# Altium schematic symbol library Inductor.SchLib: 326 symbols (part 2 of 7)
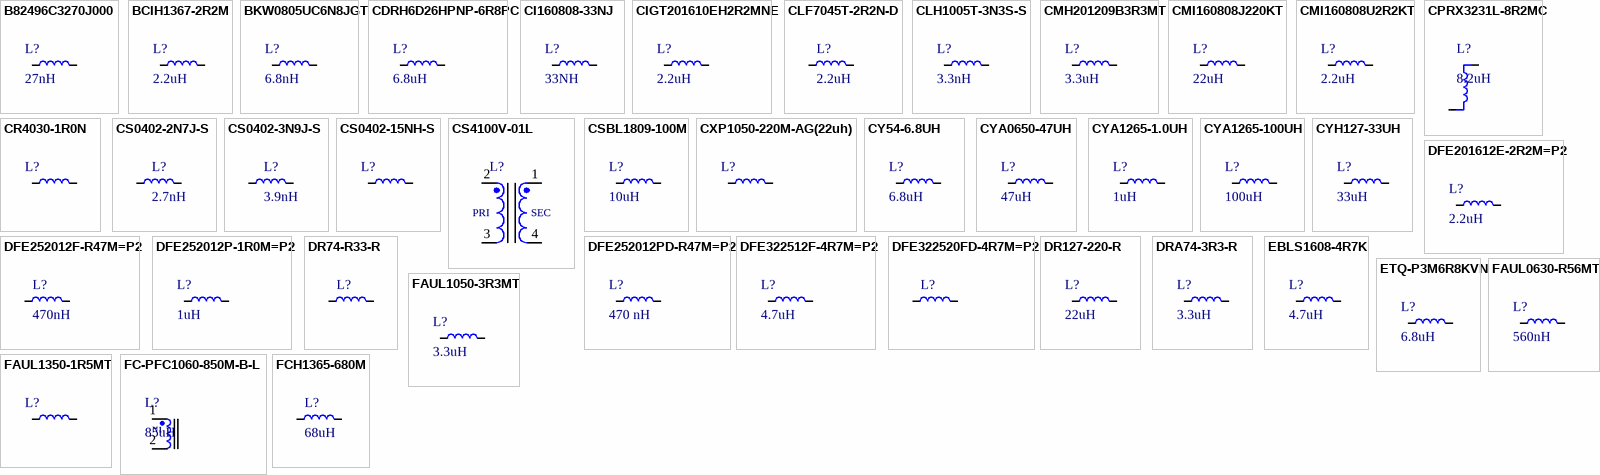
[diagram p9: symbols B82496C3270J000 to FCH1365-680M]

## CMI160808U2R2KT
designator L?, comment 2.2uH
25mA 2.2uH ±10% 800mΩ 0603 Inductors (SMD) ROHS; Manufacturer: FH; Manufacturer Part Number: CMI160808U2R2KT; Value: 2.2uH; Footprint: 0603; ComponentLink1Description: LCSC; ComponentLink1URL: https://lcsc.com/product-detail/Inductors-SMD_FH-Guangdong-Fenghua-Advanced-Tech-CMI160808U2R2KT_C284875.html; LCSC Part Number: C284875
footprint IND-0603 (1608 Metric) (0.063" L x 0.032" W (1.60mm x 0.80mm))
pins: 1, 2

## CPRX3231L-8R2MC
designator L?, comment 8.2uH
THT HIGH CURRENT POWER INDUCTOR; Manufacturer: Codaca; Manufacturer Part Number: CPRX3231L-8R2MC; Item Type: INDUCTOR; RoHS: No; Stock: 21; Pricing: 1=20.99, 10=16.268, 25=14.688, 40=13.93475, 80=12.88975, 230=12.5 (USD)
footprint CPRX3231L-8R2MC
pins: 1, 2

## CR4030-1R0N
designator L?
3.4A 1uH ±30% 5.9A SMD,4x4mm Power Inductors ROHS; Manufacturer: Ceaiya; Manufacturer Part Number: CR4030-1R0N; Package: SMD,4x4mm; LCSC Part Number: C520322; Item Type: Inductor; ComponentLink1Description: LCSC; ComponentLink1URL: https://www.lcsc.com/product-detail/Power-Inductors_Ceaiya-CR4030-1R0N_C520322.html?s_z=n_B82462G4102M
footprint CR4030-1R0N
pins: 1, 2

## CS0402-2N7J-S
designator L?, comment 2.7nH
640mA 2.7nH ±5% 120mΩ 0402 Inductors (SMD) ROHS; Manufacturer: Chilisin Elec; Manufacturer Part Number: CS0402-2N7J-S; Package: 0402; LCSC Part Number: C142181; Item Type: Inductors; ComponentLink1Description: LCSC; ComponentLink1URL: https://www.lcsc.com/product-detail/Inductors-SMD_Chilisin-Elec-CS0402-2N7J-S_C142181.html
footprint IND-0402
pins: 1, 2

## CS0402-3N9J-S
designator L?, comment 3.9nH
840mA 3.9nH ±5% 66mΩ 0402 Inductors (SMD) ROHS; Manufacturer: Chilisin Elec; Manufacturer Part Number: CS0402-3N9J-S; Package: 0402; LCSC Part Number: C329623; Item Type: Inductor; ComponentLink1Description: LCSC; ComponentLink1URL: https://www.lcsc.com/product-detail/Inductors-SMD_Chilisin-Elec-CS0402-3N9J-S_C329623.html
footprint IND-0402
pins: 1, 2

## CS0402-15NH-S
designator L?
560mA 15nH ±3% 170mΩ 0402 Inductors (SMD) ROHS; Manufacturer: Chilisin Elec; Manufacturer Part Number: CS0402-15NH-S; Package: 0402; LCSC Part Number: C329619; Item Type: Inductor; ComponentLink1Description: LCSC; ComponentLink1URL: https://www.lcsc.com/product-detail/Inductors-SMD_Chilisin-Elec-CS0402-15NH-S_C329619.html
footprint IND-0402
pins: 1, 2

## CS4100V-01L
designator L?
Transformer, Current Sense, 1: 100, 24A; Manufacturer: Coilcraft; Manufacturer Part Number: CS4100V-01L; Item Type: Inductors; Turns Ratio: 1:100; DC Resistance (DCR): 7mR; Value: 20mH; Supplier: Mouser; Supplier Part Number: 994-CS4100V-01L; RoHS: Yes; Stock: 520; Pricing: 1=11.28, 10=11.28, 50=11.28, 100=11.28, 1000=5.53, 10000=5.14 (USD); Primary Current: 24A; Packaging: Rail/Tube; Package Quantity: 29; Series: CS4xxx; Reach SVHC Compliant: No; Lead Free: Contains Lead; RoHS Compliant: Yes; ComponentLink1URL: http://www.mouser.com/ds/2/597/senhitr-463493.pdf?src-supplier=Mouser; ComponentLink1Description: http://www.mouser.com/ds/2/597/senhitr-463493.pdf?src-supplier=Mouser; ComponentLink2URL: http://www.farnell.com/datasheets/1870394.pdf?src-supplier=Farnell; ComponentLink2Description: http://www.farnell.com/datasheets/1870394.pdf?src-supplier=Farnell; ComponentLink3URL: http://www.farnell.com/datasheets/1870394.pdf?src-supplier=Element14; ComponentLink3Description: http://www.farnell.com/datasheets/1870394.pdf?src-supplier=Element14
footprint CS4100V-01L
pins: 1, 2, 3, 4
text: PRI; SEC

## CSBL1809-100M
designator L?, comment 10uH
SMD HIGH CURRENT POWER INDUCTOR; Manufacturer: Codaca; Manufacturer Part Number: CSBL1809-100M; Supplier: DigiKey; Supplier Part Number: 4044-CSBL1809-100MCT-ND; RoHS: No; Category: Fixed Inductors; Stock: 69; Pricing: 1=4.25, 10=3.304, 25=2.986, 50=2.7654 (USD)
footprint CSBL1809-100M
pins: 1, 2

## CXP1050-220M-AG(22uh)
designator L?
5.5A 22uH Molding Choke ±20% 8A 1050 Power Inductors ROHS; Manufacturer: DMBJ; Manufacturer Part Number: CXP1050-220M-AG(22uh); Package: 1050; LCSC Part Number: C7461393; Item Type: Inductor; ComponentLink1Description: LCSC; ComponentLink1URL: https://www.lcsc.com/product-detail/Power-Inductors_DMBJ-CXP1050-220M-AG-22uh_C7461393.html
footprint CXP1050-220M-AG(22uh)
pins: 1, 2

## CY54-6.8UH
designator L?, comment 6.8uH
2.4A 6.8uH ±20% 58.5mΩ SMD,5.2x5.8mm Inductors (SMD) ROHS; Manufacturer: SHOU HAN; Manufacturer Part Number: CY54-6.8UH; Package: SMD,5.2x5.8mm; LCSC Part Number: C2929430; Item Type: Inductor; ComponentLink1Description: LCSC; ComponentLink1URL: https://www.lcsc.com/product-detail/Inductors-SMD_SHOU-HAN-CY54-6-8UH_C2929430.html
footprint CY54-6.8UH
pins: 1, 2

## CYA0650-47UH
designator L?, comment 47uH
2A 47uH ±20% 250mΩ SMD,6.6x7.2mm Inductors (SMD) ROHS; Manufacturer: SHOU HAN; Manufacturer Part Number: CYA0650-47UH; Package: SMD,6.6x7.2mm; LCSC Part Number: C5189938; Item Type: Inductor; ComponentLink1Description: LCSC; ComponentLink1URL: https://www.lcsc.com/product-detail/Inductors-SMD_SHOU-HAN-CYA0650-47UH_C5189938.html
footprint CYA0650-47UH
pins: 1, 2

## CYA1265-1.0UH
designator L?, comment 1uH
32A 1uH Integrated molded inductor ±20% 54A SMD,13.8x12.8mm Power Inductors ROHS; Manufacturer: SHOU HAN; Manufacturer Part Number: CYA1265-1.0UH; Package: SMD,13.8x12.8mm; LCSC Part Number: C19268663; Item Type: Inductor; ComponentLink1Description: LCSC; ComponentLink1URL: https://lcsc.com/product-detail/Power-Inductors_SHOU-HAN-CYA1265-1-0UH_C19268663.html
footprint CYA1265-1.0UH
pins: 1, 2

## CYA1265-100UH
designator L?, comment 100uH
4.5A 100uH Molding Choke ±20% 8.5A SMD,13.8x12.8mm Power Inductors ROHS; Manufacturer: SHOU HAN; Manufacturer Part Number: CYA1265-100UH; Supplier: LCSC; LCSC Part Number: C19268674; RoHS: No; Item Type: Inductor
footprint CYA1265-100UH
pins: 1, 2

## CYH127-33UH
designator L?, comment 33uH
3A 33uH ±20% 64.8mΩ SMD,12.3x12.3mm Inductors (SMD) ROHS; Manufacturer: SHOU HAN; Manufacturer Part Number: CYH127-33UH; Package: SMD,12.3x12.3mm; LCSC Part Number: C2929502; Item Type: Inductor; ComponentLink1Description: LCSC; ComponentLink1URL: https://www.lcsc.com/product-detail/Inductors-SMD_SHOU-HAN-CYH127-33UH_C2929502.html
footprint CYH127-33UH
pins: 1, 2

## DFE201612E-2R2M=P2
designator L?, comment 2.2uH
FIXED IND 2.2UH 1.8A 116MOHM SMD; Manufacturer: Murata; Manufacturer Part Number: DFE201612E-2R2M=P2; Item Type: Inductors; Inductance Tolerance: 20%; Saturation Current: 2.4A; ESR: 116mR; Test Frequency: 1MHz; Supplier: Mouser; LCSC Part Number: C337893; RoHS: Yes; Stock: 140327; Pricing: 1=0.31, 10=0.202, 50=0.202, 100=0.158, 1000=0.145, 10000=0.104 (USD); Min Operating Temperature: -40°C; Max Operating Temperature: 125°C; Current Rating: 1.8A; Value: 2.2uH; Packaging: 13Packaging; RMS Current (Irms): 1.8A; Height: 1.2mm; ComponentLink1URL: http://www.farnell.com/datasheets/2339714.pdf?src-supplier=Farnell; ComponentLink1Description: http://www.farnell.com/datasheets/2339714.pdf?src-supplier=Farnell; ComponentLink2URL: https://search.murata.co.jp/Ceramy/image/img/P02/J(E)TE243A-0006.pdf?src-supplier=Digikey; ComponentLink2Description: https://search.murata.co.jp/Ceramy/image/img/P02/J(E)TE243A-0006.pdf?src-supplier=Digikey; ComponentLink3URL: http://www.farnell.com/datasheets/2339714.pdf?src-supplier=Newark; ComponentLink3Description: http://www.farnell.com/datasheets/2339714.pdf?src-supplier=Newark; ComponentLink4URL: https://datasheet.octopart.com/DFE201612E-2R2M%3DP2-Murata-datasheet-150582460.pdf?src-supplier=Arrow.cn; ComponentLink4Description: https://datasheet.octopart.com/DFE201612E-2R2M%3DP2-Murata-datasheet-150582460.pdf?src-supplier=Arrow.cn
footprint IND-0806
pins: 1, 2

## DFE252012F-R47M=P2
designator L?, comment 470nH
FIXED IND 470NH 4.9A 0.023OHM SM; Manufacturer: Murata; Manufacturer Part Number: DFE252012F-R47M=P2; Item Type: Inductor; Supplier: Mouser; Supplier Part Number: 81-DFE252012F-R47MP2; RoHS: Yes; Category: Fixed Inductors; Stock: 151013; Pricing: 1=0.32, 10=0.256, 50=0.256, 100=0.191, 1000=0.134, 10000=0.111 (USD); ComponentLink1URL: http://www.murata.com/~/media/webrenewal/products/inductor/chip/tokoproducts/wirewoundmetalalloychiptype/m_dfe252012f.ashx?src-supplier=Digikey; ComponentLink1Description: http://www.murata.com/~/media/webrenewal/products/inductor/chip/tokoproducts/wirewoundmetalalloychiptype/m_dfe252012f.ashx?src-supplier=Digikey; ComponentLink2URL: https://www.murata.com/~/media/webrenewal/products/inductor/chip/tokoproducts/wirewoundmetalalloychiptype/m_dfe252012f.ashx?src-supplier=Digikey; ComponentLink2Description: https://www.murata.com/~/media/webrenewal/products/inductor/chip/tokoproducts/wirewoundmetalalloychiptype/m_dfe252012f.ashx?src-supplier=Digikey; ComponentLink3URL: https://datasheet.octopart.com/DFE252012F-R47M%3DP2-Murata-datasheet-141944277.pdf?src-supplier=Arrow.cn; ComponentLink3Description: https://datasheet.octopart.com/DFE252012F-R47M%3DP2-Murata-datasheet-141944277.pdf?src-supplier=Arrow.cn
footprint Inductor 1008
pins: 1, 2

## DFE252012P-1R0M=P2
designator L?, comment 1uH
FIXED IND 1UH 3.2A 0.042OHM SMD; Manufacturer: Murata; Manufacturer Part Number: DFE252012P-1R0M=P2; Item Type: Inductor; Core Material: Ferrite; Current Rating: 4.3A; Shielding: Shielded; DC Resistance (DCR): 42mR; Test Frequency: 1MHz; Tolerance: 20%; Supplier: Future Electronics; LCSC Part Number: C882955; RoHS: Yes; Stock: 30000; Pricing: 3000=0.103, 6000=0.1, 9000=0.0987, 12000=0.0976, 15000=0.0942 (USD); Mounting Technology: Surface Mount; Case/Package: 1008; Case Code (Metric): 2520; Case Code (Imperial): 1008; Min Operating Temperature: -40°C; Max Operating Temperature: 125°C; Value: 1uH; Packaging: Cut Tape; Max DC Current: 3.2A; Series: DFE252012P; Inductance Tolerance: 20%; RMS Current (Irms): 3.2A; Saturation Current: 4.3A; ESR: 42mR; Length: 0.098inch; Width: 0.079inch; Height: 1.2mm; Height - Seated (Max): 0.039inch; Depth: 2mm; RoHS Compliant: Yes; ComponentLink1URL: http://www.farnell.com/datasheets/2550134.pdf?src-supplier=Farnell; ComponentLink1Description: http://www.farnell.com/datasheets/2550134.pdf?src-supplier=Farnell; ComponentLink2URL: https://www.murata.com/~/media/webrenewal/products/inductor/chip/tokoproducts/wirewoundmetalalloychiptype/m_dfe252012p.ashx?src-supplier=Digikey; ComponentLink2Description: https://www.murata.com/~/media/webrenewal/products/inductor/chip/tokoproducts/wirewoundmetalalloychiptype/m_dfe252012p.ashx?src-supplier=Digikey; ComponentLink3URL: http://www.murata.com/~/media/webrenewal/products/inductor/chip/tokoproducts/wirewoundmetalalloychiptype/m_dfe252012p.ashx?src-supplier=Digikey; ComponentLink3Description: http://www.murata.com/~/media/webrenewal/products/inductor/chip/tokoproducts/wirewoundmetalalloychiptype/m_dfe252012p.ashx?src-supplier=Digikey; ComponentLink4URL: http://www.toko.co.jp/products/pdf/inductors/dfe252012p.pdf?src-supplier=Avnet; ComponentLink4Description: http://www.toko.co.jp/products/pdf/inductors/dfe252012p.pdf?src-supplier=Avnet
footprint IND-1008 (2520 Metric)
pins: 1, 2

## DFE252012PD-R47M=P2
designator L?, comment 470 nH
FIXED IND 470NH 4A 0.027OHM SMD; Manufacturer: Murata; Manufacturer Part Number: DFE252012PD-R47M=P2; Item Type: Inductors; Inductance Tolerance: 20%; Saturation Current: 5.2A; ESR: 27mR; Test Frequency: 1MHz; Supplier: Mouser; Supplier Part Number: 81-DFE252012PDR47MP2; RoHS: Yes; Stock: 74061; Pricing: 1=0.48, 10=0.342, 50=0.342, 100=0.249, 1000=0.217, 10000=0.201 (USD); Min Operating Temperature: -40°C; Max Operating Temperature: 125°C; Current Rating: 4A; Value: 470nH; RMS Current (Irms): 4A; Tolerance: 20%; Height: 1.2mm; RoHS Compliant: Yes; ComponentLink1URL: http://www.farnell.com/datasheets/2616814.pdf?src-supplier=Farnell; ComponentLink1Description: http://www.farnell.com/datasheets/2616814.pdf?src-supplier=Farnell; ComponentLink2URL: https://search.murata.co.jp/Ceramy/image/img/P02/J(E)TE243A-9102.pdf?src-supplier=Digikey; ComponentLink2Description: https://search.murata.co.jp/Ceramy/image/img/P02/J(E)TE243A-9102.pdf?src-supplier=Digikey; ComponentLink3URL: http://www.farnell.com/datasheets/2616814.pdf?src-supplier=Newark; ComponentLink3Description: http://www.farnell.com/datasheets/2616814.pdf?src-supplier=Newark
footprint IND-1008 (2520 Metric)
pins: 1, 2

## DFE322512F-4R7M=P2
designator L?, comment 4.7uH
FIXED IND 4.7UH 1.6A 157MOHM SMD; Manufacturer: Murata; Manufacturer Part Number: DFE322512F-4R7M=P2; Item Type: Inductor; Supplier 1: Digi-Key; RoHS: Yes; Category: Fixed Inductors; Stock 1: 4687; Pricing 1: 1=0.61, 10=0.533, 25=0.4952, 50=0.4188, 100=0.3808, 250=0.35792, 500=0.31984, 1000=0.25892 (USD); RoHS Compliant: Yes; Supplier Part Number 1: 490-DFE322512F-4R7M=P2CT-ND; LCSC Part Number: C703083
footprint IND-1210
pins: 1, 2

## DFE322520FD-4R7M=P2
designator L?
FIXED IND 4.7UH 2A 98 MOHM SMD; Manufacturer: Murata; Manufacturer Part Number: DFE322520FD-4R7M=P2; Item Type: Inductor; Supplier: Mouser; Supplier Part Number: 81-DFE322520FD4R7MP2; RoHS: Yes; Category: Fixed Inductors; Stock: 15591; Pricing: 1=0.88, 10=0.711, 50=0.711, 100=0.523, 1000=0.523, 10000=0.435 (USD); LCSC Part Number: C2045343
footprint IND-1210
pins: 1, 2

## DR74-R33-R
designator L?
Inductor Power Shielded Drum Core 330nH 20% 100KHz Ferrite 6.26A 7.4mOhm DCR T/R; Manufacturer: Eaton Cooper; Manufacturer Part Number: DR74-R33-R; Supplier: Digikey; Supplier Part Number: 283-4071-1-ND; RoHS: Yes; Category: Fixed Inductors; Stock: 3573; Pricing: 1=0.59, 10=0.498, 25=0.4528, 50=0.4254, 100=0.353, 250=0.32588, 500=0.31876 (USD); ComponentLink1URL: https://datasheet.ciiva.com/14667/0900766b8116a153-14667792.pdf?src-supplier=Rs; ComponentLink1Description: https://datasheet.ciiva.com/14667/0900766b8116a153-14667792.pdf?src-supplier=Rs; ComponentLink2URL: https://datasheet.ciiva.com/48955/70037876-48955195.pdf?src-supplier=Allied+Electronics; ComponentLink2Description: https://datasheet.ciiva.com/48955/70037876-48955195.pdf?src-supplier=Allied+Electronics; ComponentLink3URL: https://datasheet.ciiva.com/14123/dr-series-eng-tds-14123509.pdf?src-supplier=Distrelec; ComponentLink3Description: https://datasheet.ciiva.com/14123/dr-series-eng-tds-14123509.pdf?src-supplier=Distrelec; ComponentLink4URL: https://datasheet.ciiva.com/8004/87246-8004903.pdf?src-supplier=Element14; ComponentLink4Description: https://datasheet.ciiva.com/8004/87246-8004903.pdf?src-supplier=Element14; ComponentLink5URL: https://datasheet.ciiva.com/16497/4a32919a-7470-4ae0-be45-b59e3a1351ef-16497580.pdf?src-supplier=Future+Electronics; ComponentLink5Description: https://datasheet.ciiva.com/16497/4a32919a-7470-4ae0-be45-b59e3a1351ef-16497580.pdf?src-supplier=Future+Electronics; ComponentLink6URL: https://datasheet.ciiva.com/30186/43bus-elx-ds-4315-dr-ser-30186054.pdf?src-supplier=Onlinecomponents.com; ComponentLink6Description: https://datasheet.ciiva.com/30186/43bus-elx-ds-4315-dr-ser-30186054.pdf?src-supplier=Onlinecomponents.com
footprint DR74-R33-R
pins: 1, 2

## DR127-220-R
designator L?, comment 22uH
FIXED IND 22UH 4A 39.1 MOHM SMD; Manufacturer: Eaton Cooper; Manufacturer Part Number: DR127-220-R; Item Type: Inductors; Series Resistance: 39.1mR; Supplier 1: Avnet; RoHS: Yes; Stock 1: 13650; Pricing 1: 350=0.46278 (USD); Lead Free: 5697LeadFree; ComponentLink1URL: https://datasheet.ciiva.com/14667/0900766b8116a153-14667792.pdf?src-supplier=Rs; ComponentLink1Description: https://datasheet.ciiva.com/14667/0900766b8116a153-14667792.pdf?src-supplier=Rs; ComponentLink2URL: https://datasheet.ciiva.com/26858/getdatasheetpartid-250064-26858411.pdf?src-supplier=Verical; ComponentLink2Description: https://datasheet.ciiva.com/26858/getdatasheetpartid-250064-26858411.pdf?src-supplier=Verical; ComponentLink3URL: https://datasheet.ciiva.com/27053/1771712-27053548.pdf?src-supplier=Jameco; ComponentLink3Description: https://datasheet.ciiva.com/27053/1771712-27053548.pdf?src-supplier=Jameco; ComponentLink4URL: https://datasheet.ciiva.com/16433/bus-elx-ds-4315-dr-series-16433965.pdf?src-supplier=Future+Electronics; ComponentLink4Description: https://datasheet.ciiva.com/16433/bus-elx-ds-4315-dr-series-16433965.pdf?src-supplier=Future+Electronics; ComponentLink5URL: https://datasheet.ciiva.com/22771/87246-22771606.pdf?src-supplier=Farnell; ComponentLink5Description: https://datasheet.ciiva.com/22771/87246-22771606.pdf?src-supplier=Farnell; ComponentLink6URL: https://datasheet.ciiva.com/30102/43bus-elx-ds-4315-dr-ser-30102011.pdf?src-supplier=Onlinecomponents.com; ComponentLink6Description: https://datasheet.ciiva.com/30102/43bus-elx-ds-4315-dr-ser-30102011.pdf?src-supplier=Onlinecomponents.com; ComponentLink7URL: https://datasheet.ciiva.com/16940/70037876-16940553.pdf?src-supplier=Allied+Electronics; ComponentLink7Description: https://datasheet.ciiva.com/16940/70037876-16940553.pdf?src-supplier=Allied+Electronics; ComponentLink8URL: https://datasheet.ciiva.com/8004/87246-8004871.pdf?src-supplier=Element14; ComponentLink8Description: https://datasheet.ciiva.com/8004/87246-8004871.pdf?src-supplier=Element14; ComponentLink9URL: https://datasheet.ciiva.com/8005/87246-8005177.pdf?src-supplier=Element14; ComponentLink9Description: https://datasheet.ciiva.com/8005/87246-8005177.pdf?src-supplier=Element14; Supplier Part Number 1: DR127-220-R; LCSC Part Number: C2638525
footprint DR127-220-R
pins: 1, 2

## DRA74-3R3-R
designator L?, comment 3.3uH
FIXED IND 3.3UH 4.16A 16MOHM SMD; Manufacturer: Eaton Cooper; Manufacturer Part Number: DRA74-3R3-R; Item Type: Inductors; Supplier 1: Digikey; RoHS: Yes; Stock 1: 19552; Pricing 1: 1=1.64, 10=1.385, 25=1.2588, 50=1.1834, 100=0.9819, 250=0.90636, 500=0.85602 (USD); Lead Free: 5697LeadFree; ComponentLink1URL: https://datasheet.ciiva.com/6690/9190a0eb-f996-4faf-a4d6-7b76f954f32d-6690234.pdf?src-supplier=Digikey; ComponentLink1Description: https://datasheet.ciiva.com/6690/9190a0eb-f996-4faf-a4d6-7b76f954f32d-6690234.pdf?src-supplier=Digikey; ComponentLink2URL: https://datasheet.ciiva.com/6690/9190a0eb-f996-4faf-a4d6-7b76f954f32d-6690235.pdf?src-supplier=Digikey; ComponentLink2Description: https://datasheet.ciiva.com/6690/9190a0eb-f996-4faf-a4d6-7b76f954f32d-6690235.pdf?src-supplier=Digikey; ComponentLink3URL: https://datasheet.ciiva.com/6690/9190a0eb-f996-4faf-a4d6-7b76f954f32d-6690236.pdf?src-supplier=Digikey; ComponentLink3Description: https://datasheet.ciiva.com/6690/9190a0eb-f996-4faf-a4d6-7b76f954f32d-6690236.pdf?src-supplier=Digikey; ComponentLink4URL: https://datasheet.ciiva.com/16433/9190a0eb-f996-4faf-a4d6-7b76f954f32d-16433947.pdf?src-supplier=Future+Electronics; ComponentLink4Description: https://datasheet.ciiva.com/16433/9190a0eb-f996-4faf-a4d6-7b76f954f32d-16433947.pdf?src-supplier=Future+Electronics; Supplier Part Number 1: 283-3635-1-ND; LCSC Part Number: C3222421
footprint DRA74-3R3-R
pins: 1, 2

## EBLS1608-4R7K
designator L?, comment 4.7uH
15mA 4.7uH ±10% 2.1Ω 0603 Inductors (SMD) ROHS; Manufacturer: HYHONGYEX; Manufacturer Part Number: EBLS1608-4R7K; Value: 4.7uH; Footprint: 0603; ComponentLink1Description: LCSC; ComponentLink1URL: https://lcsc.com/product-detail/Inductors-SMD_HYHONGYEX-EBLS1608-4R7K_C963793.html; LCSC Part Number: C963793
footprint IND-0603 (1608 Metric) (0.063" L x 0.032" W (1.60mm x 0.80mm))
pins: 1, 2

## ETQ-P3M6R8KVN
designator L?, comment 6.8uH
FIXED IND 6.8UH 4.5A 50.16 MOHM; Manufacturer: Panasonic; Manufacturer Part Number: ETQ-P3M6R8KVN; Item Type: Inductors; Value: 45.6mR; Supplier: Mouser; LCSC Part Number: C412310; RoHS: Yes; Stock: 4626; Pricing: 1=0.84, 10=0.609, 50=0.609, 100=0.502, 1000=0.405, 10000=0.344 (USD); ComponentLink1URL: http://www.farnell.com/datasheets/2820815.pdf?src-supplier=Farnell; ComponentLink1Description: http://www.farnell.com/datasheets/2820815.pdf?src-supplier=Farnell; ComponentLink2URL: https://industrial.panasonic.com/cdbs/www-data/pdf/AGL0000/AGL0000C63.pdf?src-supplier=Digikey; ComponentLink2Description: https://industrial.panasonic.com/cdbs/www-data/pdf/AGL0000/AGL0000C63.pdf?src-supplier=Digikey; ComponentLink3URL: https://datasheet.octopart.com/ETQ-P3M6R8KVN-Panasonic-datasheet-136412728.pdf?src-supplier=Element14; ComponentLink3Description: https://datasheet.octopart.com/ETQ-P3M6R8KVN-Panasonic-datasheet-136412728.pdf?src-supplier=Element14
footprint ETQP3M6R8KVN
pins: 1, 2

## FAUL0630-R56MT
designator L?, comment 560nH
16.5A 560nH ±20% 18A SMD,6.6x7mm Power Inductors ROHS; Manufacturer: cjiang (Changjiang Microelectronics Tech); Manufacturer Part Number: FAUL0630-R56MT; Package: SMD,6.6x7mm; LCSC Part Number: C3040346; Item Type: Inductor; ComponentLink1Description: LCSC; ComponentLink1URL: https://www.lcsc.com/product-detail/Power-Inductors_cjiang-Changjiang-Microelectronics-Tech-FAUL0630-R56MT_C3040346.html
footprint FAUL0630-R56MT
pins: 1, 2

## FAUL1050-3R3MT
designator L?, comment 3.3uH
13A 3.3uH Molding Choke ±20% 16A - Power Inductors ROHS; Manufacturer: cjiang; Manufacturer Part Number: FAUL1050-3R3MT; Footprint: Custom; ComponentLink1Description: LCSC; ComponentLink1URL: https://www.lcsc.com/product-detail/Power-Inductors_cjiang-Changjiang-Microelectronics-Tech-FAUL1050-3R3MT_C5298289.html; LCSC Part Number: C5298289; Item Type: Inductor
footprint FAUL1050-3R3MT
pins: 1, 2

## FAUL1350-1R5MT
designator L?
23A 1.5uH Integrated molded inductor ±20% 33A SMD,12.6x13.5mm Power Inductors ROHS; Manufacturer: cjiang; Manufacturer Part Number: FAUL1350-1R5MT; Package: SMD,12.6x13.5mm; LCSC Part Number: C5298318; Item Type: Inductors; ComponentLink1Description: LCSC; ComponentLink1URL: https://www.lcsc.com/product-detail/Power-Inductors_cjiang-Changjiang-Microelectronics-Tech-FAUL1350-1R5MT_C5298318.html
footprint FAUL1350-1R5MT
pins: 1, 2

## FC-PFC1060-850M-B-L
designator L?, comment 85uH
20A 85uH ±15% 10A Plugin,D=35mm Power Inductors ROHS; Manufacturer: FANGCHENG; Manufacturer Part Number: FC-PFC1060-850M-B-L; Package: Plugin,D=35mm; LCSC Part Number: C22461812; Item Type: Inductor; ComponentLink1Description: LCSC; ComponentLink1URL: https://www.lcsc.com/product-detail/Power-Inductors_FANGCHENG-FC-PFC1060-850M-B-L_C22461812.html
footprint FC-PFC1060-850M-B-L
pins: 1, 2
text: N1

## FCH1365-680M
designator L?, comment 68uH
4.5A 68uH Molding Choke ±20% 5.5A SMD,13.7x12.8mm Power Inductors ROHS; Manufacturer: FANGCHENG; Manufacturer Part Number: FCH1365-680M; Package: SMD,13.7x12.8mm; LCSC Part Number: C20415558; Item Type: Inductor; ComponentLink1Description: LCSC; ComponentLink1URL: https://www.lcsc.com/product-detail/Power-Inductors_FANGCHENG-FCH1365-680M_C20415558.html
footprint FCH1365-680M
pins: 1, 2

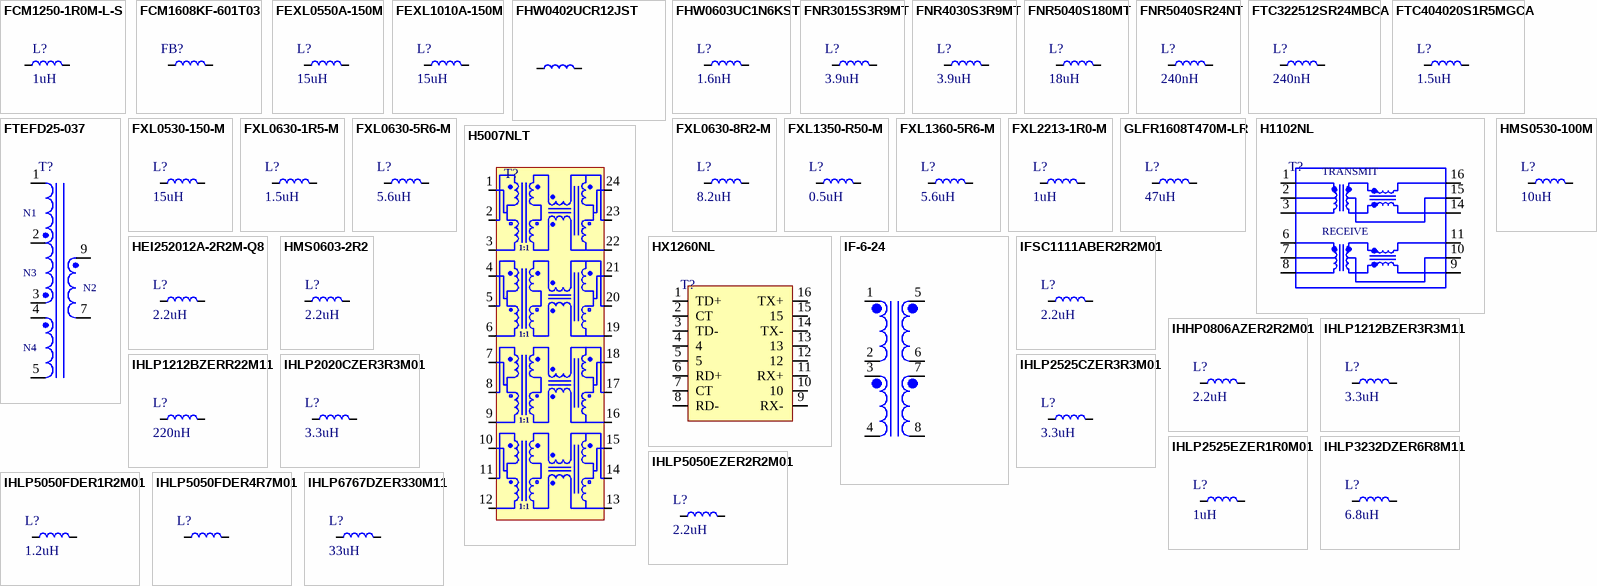
[diagram p2: symbols FCM1250-1R0M-L-S to IHLP6767DZER330M11]

## FCM1250-1R0M-L-S
designator L?, comment 1uH
25.5A 1uH Molding Choke ±20% 37A SMD,13.5x12.5mm Power Inductors ROHS; Manufacturer: FANGCHENG; Manufacturer Part Number: FCM1250-1R0M-L-S; Package: SMD,13.5x12.5mm; LCSC Part Number: C5142781; Item Type: Inductor; ComponentLink1Description: LCSC; ComponentLink1URL: https://www.lcsc.com/product-detail/Power-Inductors_FANGCHENG-FCM1250-1R0M-L-S_C5142781.html
footprint FCM1250-1R0M-L-S
pins: 1, 2

## FCM1608KF-601T03
designator FB?
500mΩ ±25% 600Ω@100MHz 0603 Ferrite Beads ROHS; Manufacturer: Tai Tech; Manufacturer Part Number: FCM1608KF-601T03; Current Rating: 350mA; Number of Circuits: 1NUMBER; Impedance: 600R; DC Resistance (DCR): 500mR; Supplier: Digikey; LCSC Part Number: C141723; RoHS: No; Item Type: Ferrite Bead; Pricing: 1=0.1, 10=0.02, 25=0.0176, 50=0.0158, 100=0.0142, 250=0.01236, 500=0.01106, 1000=0.00986 (USD); Length: 1.6mm; Width: 800um; Height: 800um; Reach SVHC Compliant: 4188SVHC
footprint IND-0603 (1608 Metric) (0.063" L x 0.032" W (1.60mm x 0.80mm))
pins: 1, 2

## FEXL0550A-150M
designator L?, comment 15uH
3.9A 15uH Molding Choke ±20% 3.7A SMD,5.5x5.3mm Power Inductors ROHS; Manufacturer: cjiang; Manufacturer Part Number: FEXL0550A-150M; Package: SMD,5.5x5.3mm; LCSC Part Number: C5378518; Item Type: Inductor; ComponentLink1Description: LCSC; ComponentLink1URL: https://www.lcsc.com/product-detail/Power-Inductors_cjiang-Changjiang-Microelectronics-Tech-FEXL0550A-150M_C5378518.html
footprint FEXL0550A-150M
pins: 1, 2

## FEXL1010A-150M
designator L?, comment 15uH
13.8A 15uH Integrated molded inductor ±20% 15.5A SMD,11.9x11mm Power Inductors ROHS; Manufacturer: cjiang; Manufacturer Part Number: FEXL1010A-150M; Package: SMD,11.9x11mm; LCSC Part Number: C5378579; Item Type: Inductor; ComponentLink1Description: LCSC; ComponentLink1URL: https://www.lcsc.com/product-detail/Power-Inductors_cjiang-Changjiang-Microelectronics-Tech-FEXL1010A-150M_C5378579.html
footprint FEXL1010A-150M
pins: 1, 2

## FHW0402UCR12JST
designator L?, comment 120nH
30mA 120nH ±5% 2.2Ω 0402 Inductors (SMD) ROHS; Manufacturer: FH; Manufacturer Part Number: FHW0402UCR12JST; Package: 0402; LCSC Part Number: C317977; Item Type: Inductor; ComponentLink1Description: LCSC; ComponentLink1URL: https://www.lcsc.com/product-detail/Inductors-SMD_KOHERelec-MDA1040-470M_C2847557.html
footprint IND-0402
pins: 1, 2

## FHW0603UC1N6KST
designator L?, comment 1.6nH
700mA 1.6nH ±10% 40mΩ 0603 Inductors (SMD) ROHS; Manufacturer Part Number: FHW0603UC1N6KST; Manufacturer: FH; Footprint: 0603; Value: 1.6nH; LCSC Part Number: C317978; ComponentLink1Description: LCSC; ComponentLink1URL: https://www.lcsc.com/product-detail/Inductors-SMD_FH-Guangdong-Fenghua-Advanced-Tech-FHW0603UC1N6KST_C317978.html
footprint IND-0603 (1608 Metric) (0.063" L x 0.032" W (1.60mm x 0.80mm))
pins: 1, 2

## FNR3015S3R9MT
designator L?, comment 3.9uH
1.5A 3.9uH ±20% 1.4A SMD,3x3mm Power Inductors ROHS; Manufacturer: cjiang (Changjiang Microelectronics Tech); Manufacturer Part Number: FNR3015S3R9MT; Package: SMD,3x3mm; LCSC Part Number: C167751; Item Type: Inductor; ComponentLink1Description: LCSC; ComponentLink1URL: https://www.lcsc.com/product-detail/Power-Inductors_cjiang-Changjiang-Microelectronics-Tech-FNR3015S3R9MT_C167751.html
footprint FNR3015S3R9MT
pins: 1, 2

## FNR4030S3R9MT
designator L?, comment 3.9uH
2.3A 3.9uH ±20% 3.3A SMD,4x4mm Power Inductors ROHS; Manufacturer: cjiang; Manufacturer Part Number: FNR4030S3R9MT; Footprint: Custom; ComponentLink1Description: LCSC; ComponentLink1URL: https://www.lcsc.com/product-detail/Power-Inductors_cjiang-Changjiang-Microelectronics-Tech-FNR4030S3R9MT_C167872.html; LCSC Part Number: C167872; Item Type: Inductor
footprint FNR4030S3R9MT
pins: 1, 2

## FNR5040S180MT
designator L?, comment 18uH
1.65A 18uH ±20% 2A SMD,5x5mm Power Inductors ROHS; Manufacturer: cjiang (Changjiang Microelectronics Tech); Manufacturer Part Number: FNR5040S180MT; Package: SMD,5x5mm; LCSC Part Number: C167970; Item Type: Inductor; ComponentLink1Description: LCSC; ComponentLink1URL: https://www.lcsc.com/product-detail/Power-Inductors_cjiang-Changjiang-Microelectronics-Tech-FNR5040S180MT_C167970.html
footprint FNR5040S180MT
pins: 1, 2

## FNR5040SR24NT
designator L?, comment 240nH
6.4A 240nH ±30% 8mΩ SMD Power Inductors ROHS; Manufacturer: cjiang; Manufacturer Part Number: FNR5040SR24NT; Footprint: Custom; ComponentLink1Description: LCSC; ComponentLink1URL: https://www.lcsc.com/product-detail/span-style-background-color-ff0-Power-span-span-style-background-color-ff0-Inductors-span_cjiang-Changjiang-Microelectronics-Tech-FNR5040SR24NT_C167951.html; LCSC Part Number: C167951
footprint FNR5040SR24NT_
pins: 1, 2

## FTC322512SR24MBCA
designator L?, comment 240nH
9A 240nH Molding Choke ±20% 11A SMD,2.5x3.2mm Power Inductors ROHS; Manufacturer: cjiang; Manufacturer Part Number: FTC322512SR24MBCA; Package: SMD,2.5x3.2mm; LCSC Part Number: C5832379; Item Type: Inductor; ComponentLink1Description: LCSC; ComponentLink1URL: https://www.lcsc.com/product-detail/Power-Inductors_cjiang-Changjiang-Microelectronics-Tech-FTC322512SR24MBCA_C5832379.html
footprint FTC322512SR24MBCA
pins: 1, 2

## FTC404020S1R5MGCA
designator L?, comment 1.5uH
6A 1.5uH ±20% 10.5A SMD,4.1x4.1mm Power Inductors ROHS; Manufacturer: cjiang (Changjiang Microelectronics Tech); Manufacturer Part Number: FTC404020S1R5MGCA; Package: SMD,4.1x4.1mm; LCSC Part Number: C39676069; Item Type: Inductor; ComponentLink1Description: LCSC; ComponentLink1URL: https://www.lcsc.com/product-detail/Power-Inductors_cjiang-Changjiang-Microelectronics-Tech-FTC404020S1R5MGCA_C39676069.html
footprint FTC404020S1R5MGCA
pins: 1, 2

## FTEFD25-037
designator T?
12V/1.5A transformer; Manufacturer Part Number: FTEFD25-037; Package: Custom; Item Type: Transformer
footprint FTEFD25-037
pins: 1, 2, 3, 4, 5, 7, 9
text: N1; N3; N2; N4

## FXL0530-150-M
designator L?, comment 15uH
1.7A 15uH Molding Choke ±20% 2.2A SMD,5.2x5.4mm Power Inductors ROHS; Manufacturer: cjiang; Manufacturer Part Number: FXL0530-150-M; Package: SMD,5.2x5.4mm; LCSC Part Number: C7471117; Item Type: Inductor; ComponentLink1Description: LCSC; ComponentLink1URL: https://www.lcsc.com/product-detail/Power-Inductors_cjiang-Changjiang-Microelectronics-Tech-FXL0530-150-M_C7471117.html
footprint FXL0530-150-M
pins: 1, 2

## FXL0630-1R5-M
designator L?, comment 1.5uH
IND SMD 12A 1.5uH ±20% 12.1mΩ; Manufacturer: cjiang(Changjiang Microelectronics Tech); Manufacturer Part Number: FXL0630-1R5-M; Item Type: Inductor; Rated Current: 12A; Inductance: 1.5uH; Tolerance: ±20%; DC Resistance (DCR): 12.1mΩ; ComponentLink1Description: LCSC; ComponentLink1URL: https://www.lcsc.com/product-detail/Power-Inductors_cjiang-Changjiang-Microelectronics-Tech-FXL0630-1R5-M_C167217.html; LCSC Part Number: C167217
footprint FXL0630-1R5-M_ (12A 1.5uH ±20% 12.1mO SMD Power Inductors)
pins: 1, 2

## FXL0630-5R6-M
designator L?, comment 5.6uH
5.5A 5.6uH Molding Choke ±20% 6.5A SMD,6.6x7mm Power Inductors ROHS; Manufacturer: cjiang; Manufacturer Part Number: FXL0630-5R6-M; Package: SMD,6.6x7mm; LCSC Part Number: C475914; Item Type: Inductor; ComponentLink1Description: LCSC; ComponentLink1URL: https://www.lcsc.com/product-detail/Power-Inductors_cjiang-Changjiang-Microelectronics-Tech-FXL0630-5R6-M_C475914.html
footprint FXL0630-5R6-M
pins: 1, 2

## FXL0630-8R2-M
designator L?, comment 8.2uH
5A 8.2uH ±20% 54mΩ 6A SMD,7x6.6x2.8mm Power Inductors ROHS; Manufacturer: Cjiang; Manufacturer Part Number: FXL0630-8R2-M; LCSC Part Number: C167222; Item Type: Inductor; ComponentLink1Description: LCSC; ComponentLink1URL: https://www.lcsc.com/product-detail/Power-Inductors_cjiang-Changjiang-Microelectronics-Tech-FXL0630-8R2-M_C167222.html
footprint FXL0630-8R2-M
pins: 1, 2

## FXL1350-R50-M
designator L?, comment 0.5uH
38A 0.5uH ±20% 48A SMD,13.45x12.6x4.8mm Power Inductors ROHS; Manufacture: cjiang (Changjiang Microelectronics Tech); Manufacture Part number: FXL1350-R50-M; Pakage: SMD,13.45x12.6x4.8mm; LCSC part number: C526008; Item type: Inductor; ComponentLink1Description: LCSC; ComponentLink1URL: https://www.lcsc.com/product-detail/Power-Inductors_cjiang-Changjiang-Microelectronics-Tech-FXL1350-R50-M_C526008.html
footprint FXL1350-R50-M
pins: 1, 2

## FXL1360-5R6-M
designator L?, comment 5.6uH
18A 5.6uH Integrated molded inductor ±20% 22.5A SMD,12.6x13.5mm Power Inductors ROHS; Manufacturer: cjiang; Manufacturer Part Number: FXL1360-5R6-M; Package: SMD,12.6x13.5mm; LCSC Part Number: C526022; Item Type: Inductor; ComponentLink1Description: LCSC; ComponentLink1URL: https://www.lcsc.com/product-detail/Power-Inductors_cjiang-Changjiang-Microelectronics-Tech-FXL1360-5R6-M_C526022.html
footprint FXL1360-5R6-M
pins: 1, 2

## FXL2213-1R0-M
designator L?, comment 1uH
60A 1uH ±20% 60A SMD,23.5x22mm Power Inductors ROHS; Manufacturer: cjiang; Manufacturer Part Number: FXL2213-1R0-M; Package: SMD,23.5x22mm; LCSC Part Number: C22378751; Item Type: Inductors; ComponentLink1Description: LCSC; ComponentLink1URL: https://www.lcsc.com/product-detail/Power-Inductors_cjiang-Changjiang-Microelectronics-Tech-FXL2213-1R0-M_C22378751.html
footprint FXL2213-1R0-M
pins: 1, 2

## GLFR1608T470M-LR
designator L?, comment 47uH
Inductor Power Chip Shielded Wirewound 47uH 20% 100mA 2.3Ohm DCR 0603; Manufacturer: TDK; Manufacturer Part Number: GLFR1608T470M-LR; Current Rating: 35mA; Saturation Current: 50mA; DC Resistance (DCR): 2.3R; Supplier 1: Farnell; RoHS: Yes; Category: Fixed Inductors; Pricing 1: 1=0.28600, 25=0.23800, 50=0.20000, 100=0.16500, 250=0.15200, 500=0.12800 (GBP); Mount: Surface Mount; Case/Package: 0603; Number of Pins: 2; Case Code (Metric): 1608; Case Code (Imperial): 0603; Min Operating Temperature: -40°C; Max Operating Temperature: 105°C; Inductance Tolerance: 20%; Package Quantity: 4000; Tolerance: 20%; Packaging: Tape and Reel; Shielding: Shielded; Inductance: 47uH; Max DC Current: 100mA; Termination: SMD/SMT; DC Current: 100mA; Series: GLFR; Length: 0.063inch; Width: 0.8mm; Height: 0.031inch; Depth: 1mm; REACH SVHC: No SVHC; Military Standard: Not; RoHS Compliant: Yes; ComponentLink1URL: https://datasheet.ciiva.com/1040/glfrseries-1040696.pdf?src-supplier=Digi-Key; ComponentLink1Description: https://datasheet.ciiva.com/1040/glfrseries-1040696.pdf?src-supplier=Digi-Key; ComponentLink2URL: https://datasheet.ciiva.com/1040/glfrseries-1040695.pdf?src-supplier=Digi-Key; ComponentLink2Description: https://datasheet.ciiva.com/1040/glfrseries-1040695.pdf?src-supplier=Digi-Key; ComponentLink3URL: https://datasheet.ciiva.com/1040/glfrseries-1040697.pdf?src-supplier=Digi-Key; ComponentLink3Description: https://datasheet.ciiva.com/1040/glfrseries-1040697.pdf?src-supplier=Digi-Key; ComponentLink4URL: https://datasheet.ciiva.com/30209/e531-glfr1608-30209531.pdf?src-supplier=Onlinecomponents.com; ComponentLink4Description: https://datasheet.ciiva.com/30209/e531-glfr1608-30209531.pdf?src-supplier=Onlinecomponents.com; Supplier Part Number 1: 1844011; Item Type: Inductor
footprint IND-0603 (1608 Metric) (0.063" L x 0.032" W (1.60mm x 0.80mm))
pins: 1, 2

## H1102NL
designator T?
XFRMR MAGNETIC 1PORT 1:1 10/100; Manufacturer: Pulse; Manufacturer Part Number: H1102NL; Shielding: Unshielded; Isolation Voltage: 1.5kV; Insertion Loss: -1.1dB; Return Loss: -11.5dB; Lead/Base Style: Gull Wing; DC Resistance (DCR): 650mR; Value: 350uH; Item Type: RJ45 Transformer; Supplier: Avnet; Supplier Part Number: H1102NL; RoHS: Yes; Category: Transformers; Stock: 500; Pricing: 1=3.05066, 10=2.98754, 30=2.92442, 50=2.8613, 100=2.79819, 250=2.73507, 500=2.68247 (USD); Mounting Technology: Surface Mount; Case/Package: Module; Pins: 16; Weight: 0.098767oz; Min Operating Temperature: 0°C; Max Operating Temperature: 70°C; Packaging: Rail/Tube; Package Quantity: 40; Turns Ratio: 1:1; Termination: SMD/SMT; Series: -; Length: 12.7mm; Width: 7.11mm; Height: 6.09mm; Depth: 9.53mm; Height - Seated (Max): 6.22mm; Radiation Hardening: No; RoHS Compliant: Yes; Lead Free: Lead Free; ComponentLink1URL: https://datasheet.ciiva.com/2938/10-100base-tsingleportsmdmagnetics-rev2008-2938779.pdf?src-supplier=Digikey; ComponentLink1Description: https://datasheet.ciiva.com/2938/10-100base-tsingleportsmdmagnetics-rev2008-2938779.pdf?src-supplier=Digikey; LCSC Part Number: C18584
footprint H1102NLT
pins: 1, 2, 3, 6, 7, 8, 9, 10, 11, 14, 15, 16
text: TRANSMIT; RECEIVE

## H5007NLT
designator T?
TRANSFORMER MODULE GIGABIT 1PORT; Manufacturer: Pulse; Manufacturer Part Number: H5007NLT; Shielding: Unshielded; Turns Ratio: 1:1; Isolation Voltage: 1.5kV; Insertion Loss: 1dB; Return Loss: -10dB; Lead/Base Style: Gull Wing; Supplier: Digikey; Supplier Part Number: 553-1535-1-ND; RoHS: Yes; Category: Transformers; Stock: 8722; Pricing: 1=8.65, 10=6.727, 25=6.5448, 50=5.6358, 100=5.3813 (USD); Mounting Technology: Surface Mount; Case/Package: Module; Pins: 24; Weight: 0.056438oz; Min Operating Temperature: 0°C; Max Operating Temperature: 70°C; Packaging: Tape and Reel; Package Quantity: 1; Termination: SMD/SMT; Series: -; Length: 17.53mm; Width: 12.2mm; Height: 5.51mm; Height - Seated (Max): 5.76mm; Depth: 16mm; Radiation Hardening: No; RoHS Compliant: Yes; ComponentLink1URL: https://datasheet.ciiva.com/2938/1000base-tmagneticsmodules-2938963.pdf?src-supplier=Digikey; ComponentLink1Description: https://datasheet.ciiva.com/2938/1000base-tmagneticsmodules-2938963.pdf?src-supplier=Digikey; ComponentLink2URL: https://datasheet.ciiva.com/2938/1000base-tmagneticsmodules-2938964.pdf?src-supplier=Digikey; ComponentLink2Description: https://datasheet.ciiva.com/2938/1000base-tmagneticsmodules-2938964.pdf?src-supplier=Digikey; ComponentLink3URL: https://datasheet.ciiva.com/2938/1000base-tmagneticsmodules-2938965.pdf?src-supplier=Digikey; ComponentLink3Description: https://datasheet.ciiva.com/2938/1000base-tmagneticsmodules-2938965.pdf?src-supplier=Digikey; LCSC Part Number: C110248; Item Type: TRANSFORMER
footprint H5007NLT
pins: 1, 2, 3, 4, 5, 6, 7, 8, 9, 10, 11, 12, 13, 14, 15, 16, 17, 18, 19, 20, 21, 22, 23, 24

## HEI252012A-2R2M-Q8
designator L?, comment 2.2uH
2.5A 2.2uH ±20% 74mΩ SMD Power Inductors ROHS; Manufacturer: Chilisin Elec; Manufacturer Part Number: HEI252012A-2R2M-Q8; ComponentLink1Description: LCSC; ComponentLink1URL: https://lcsc.com/product-detail/Power-Inductors_Chilisin-Elec-HEI252012A-2R2M-Q8_C412888.html; Footprint: Custom
footprint HEI252012A-2R2M-Q8_ (IND SMD 2.2uH 2.5A)
pins: 1, 2

## HMS0530-100M
designator L?, comment 10uH
3.2A 10uH 4A 115mΩ Molded Inductor ±20% SMD,5.4x5.2mm Fixed Inductors RoHS; Manufacturer: SHOU HAN; Manufacturer Part Number: CYA1265-100UH; Supplier: LCSC; LCSC Part Number: C19268674; RoHS: No; Item Type: Inductor
footprint IND-SMD_HMS0530-4R7M
pins: 1, 2

## HMS0603-2R2
designator L?, comment 2.2uH
8A 2.2uH Integrated molded inductor 10A SMD,7.4x6.6mm Power Inductors ROHS; Manufacturer: ZE; Manufacturer Part Number: HMS0603-2R2; Package: SMD,7.4x6.6mm; LCSC Part Number: C967697; Item Type: Inductor; ComponentLink1Description: LCSC; ComponentLink1URL: https://www.lcsc.com/product-detail/Power-Inductors_ZE-HMS0603-2R2_C967697.html
footprint HMS0603-2R2
pins: 1, 2

## HX1260NL
designator T?
XFRMR MODULE 1PORT 1:1 10/100; Manufacturer: Pulse Electronics; Manufacturer Part Number: HX1260NL; Item Type: Transformers; Insertion Loss (dB): -1.1dB; Isolation Voltage: 1.5kV; Lead/Base Style: Gull Wing; Number of Circuits: 1; Return Loss: -10dB; Shielding: Unshielded; Supplier: DigiKey; Supplier Part Number: 553-1615-5-ND; RoHS: Compliant; Stock: 1640; Pricing: 1=4.18, 10=3.782, 40=3.554, 80=3.4445, 120=3.38175, 280=3.25371, 520=3.16279, 1000=3.06911 (USD); Case/Package: Module; Depth: 9.65mm; Height: 6mm; Height - Seated (Max): 6.25mm; Length: 12.7mm; Lifecycle Status: Production; Max Operating Temperature: 70°C; Min Operating Temperature: 0°C; Mounting Technology: Surface Mount; Pins: 16; REACH SVHC: Yes; Termination: SMD/SMT; Turns Ratio: 1:1; Width: 7.11mm; ComponentLink1URL: https://datasheet.octopart.com:443/HX1260NL-Pulse-datasheet-137329798.pdf?src-supplier=Master+Electronics; ComponentLink1Description: https://datasheet.octopart.com:443/HX1260NL-Pulse-datasheet-137329798.pdf?src-supplier=Master+Electronics; ComponentLink2URL: https://datasheet.octopart.com:443/HX1260NL-Pulse-datasheet-10315868.pdf?src-supplier=_legacy+Avnet; ComponentLink2Description: https://datasheet.octopart.com:443/HX1260NL-Pulse-datasheet-10315868.pdf?src-supplier=_legacy+Avnet; ComponentLink3URL: https://datasheet.octopart.com:443/HX1260NL-Pulse-datasheet-150022073.pdf?src-supplier=Sager+Electronics; ComponentLink3Description: https://datasheet.octopart.com:443/HX1260NL-Pulse-datasheet-150022073.pdf?src-supplier=Sager+Electronics; ComponentLink4URL: https://datasheet.octopart.com:443/HX1260NL-Pulse-datasheet-5333907.pdf?src-supplier=Factory+Futures; ComponentLink4Description: https://datasheet.octopart.com:443/HX1260NL-Pulse-datasheet-5333907.pdf?src-supplier=Factory+Futures
footprint HX1260NL
pins: 1 TD+, 2 CT, 3 TD-, 4, 5, 6 RD+, 7 CT, 8 RD-, 9 RX-, 10, 11 RX+, 12, 13, 14 TX-, 15, 16 TX+

## IF-6-24
designator T?
PWR XFMR SEMI-TORO 6VA TH; Item Type: Transformer; Max Output current: 250mA; Primary Winding(s): Dual; ComponentLink1Description: LCSC; Supplier: Digi-Key; Supplier Part Number: IF-6-24-ND; RoHS: Yes; Category: Transformers; Pricing: 48=16.93771 (USD); Mounting Technology: Through Hole; Weight: 196g; Package Quantity: 48; Series: IF; Termination: PC Pin; Secondary Winding(s): Dual; Length: 53mm; Width: 44mm; Height: 22.6mm; Height - Seated (Max): 22.6mm; RoHS Compliant: Yes; Lead Free: Lead Free; ComponentLink2URL: https://datasheet.ciiva.com/2936/if-2936536.pdf?src-supplier=Digi-Key; ComponentLink2Description: https://datasheet.ciiva.com/2936/if-2936536.pdf?src-supplier=Digi-Key
footprint IF-6-24
pins: 1, 2, 3, 4, 5, 6, 7, 8

## IFSC1111ABER2R2M01
designator L?, comment 2.2uH
FIXED IND 2.2UH 1.9A 98 MOHM SMD; Manufacturer: Vishay Dale; Manufacturer Part Number: IFSC1111ABER2R2M01; Item Type: Inductors; Supplier: Mouser; LCSC Part Number: C2042415; RoHS: Yes; Stock: 4410; Pricing: 1=0.47, 10=0.32, 50=0.32, 100=0.251, 1000=0.236, 10000=0.201 (USD); ComponentLink1URL: https://datasheet.ciiva.com/4954/sc11ab01-244479-4954323.pdf?src-supplier=Mouser; ComponentLink1Description: https://datasheet.ciiva.com/4954/sc11ab01-244479-4954323.pdf?src-supplier=Mouser; ComponentLink2URL: https://datasheet.ciiva.com/3081/sc11ab01-3081860.pdf?src-supplier=Avnet; ComponentLink2Description: https://datasheet.ciiva.com/3081/sc11ab01-3081860.pdf?src-supplier=Avnet; ComponentLink3URL: https://datasheet.ciiva.com/1049/sc11ab01-1049498.pdf?src-supplier=Digikey; ComponentLink3Description: https://datasheet.ciiva.com/1049/sc11ab01-1049498.pdf?src-supplier=Digikey; ComponentLink4URL: https://datasheet.ciiva.com/1049/sc11ab01-1049499.pdf?src-supplier=Digikey; ComponentLink4Description: https://datasheet.ciiva.com/1049/sc11ab01-1049499.pdf?src-supplier=Digikey; ComponentLink5URL: https://datasheet.ciiva.com/1049/sc11ab01-1049500.pdf?src-supplier=Digikey; ComponentLink5Description: https://datasheet.ciiva.com/1049/sc11ab01-1049500.pdf?src-supplier=Digikey; ComponentLink6URL: https://datasheet.ciiva.com/8017/sc11az01-8017557.pdf?src-supplier=Element14; ComponentLink6Description: https://datasheet.ciiva.com/8017/sc11az01-8017557.pdf?src-supplier=Element14; ComponentLink7URL: https://datasheet.ciiva.com/22726/1730402-22726028.pdf?src-supplier=Element14; ComponentLink7Description: https://datasheet.ciiva.com/22726/1730402-22726028.pdf?src-supplier=Element14
footprint IFSC1111ABER2R2M01
pins: 1, 2

## IHHP0806AZER2R2M01
designator L?, comment 2.2uH
FIXED IND 2.2UH 2A 158 MOHM SMD; Manufacturer: Vishay Dale; Manufacturer Part Number: IHHP0806AZER2R2M01; Inductor Type: GENERAL PURPOSE INDUCTOR; Item Type: Inductor; Supplier 1: Avnet; RoHS: Yes; Category: Fixed Inductors; Stock 1: 9000; Pricing 1: 3000=0.14871 (USD); RoHS Compliant: Yes; ComponentLink1URL: https://datasheet.ciiva.com:443/pdfs/VipMasterIC/IC/VISH/VISH-S-A0002932032/VISH-S-A0002932032-1.pdf?src-supplier=IHS+Markit; ComponentLink1Description: https://datasheet.ciiva.com:443/pdfs/VipMasterIC/IC/VISH/VISH-S-A0002932032/VISH-S-A0002932032-1.pdf?src-supplier=IHS+Markit; ComponentLink2URL: http://www.farnell.com/datasheets/1955141.pdf?src-supplier=Farnell; ComponentLink2Description: http://www.farnell.com/datasheets/1955141.pdf?src-supplier=Farnell; ComponentLink3URL: http://www.farnell.com/datasheets/1955141.pdf?src-supplier=Element14; ComponentLink3Description: http://www.farnell.com/datasheets/1955141.pdf?src-supplier=Element14; ComponentLink4URL: http://www.vishay.com/docs/34382/ihhp-0806az-01.pdf?src-supplier=Digi-Key; ComponentLink4Description: http://www.vishay.com/docs/34382/ihhp-0806az-01.pdf?src-supplier=Digi-Key; Supplier Part Number 1: IHHP0806AZER2R2M01; LCSC Part Number: C1330968
footprint IHHP0806AZER2R2M01
pins: 1, 2

## IHLP1212BZER3R3M11
designator L?, comment 3.3uH
FIXED IND 3.3UH 2.7A 61 MOHM SMD; Manufacturer: Vishay; Manufacturer Part Number: IHLP1212BZER3R3M11; Item Type: Inductors; Core Material: Composite; DC Resistance (DCR): 61mΩ; Value: 3.3µH; Inductance Tolerance: 20%; Number of Circuits: 1; Saturation Current: 3.3A; Self Resonant Frequency: 45MHz; ESR: 56mΩ; Shielding: Yes; Test Frequency: 100kHz; Supplier: Arrow Electronics; LCSC Part Number: C844969; RoHS: Compliant; Stock: 1; Pricing: 1=0.234 (USD); Case/Package: 1212; Case Code (Imperial): 1212; Case Code (Metric): 3630; China RoHS: Compliant; Contact Plating: Tin; Current Rating: 2.7A; Depth: 3.2mm; Height: 2mm; Height - Seated (Max): 2.0066mm; Lead Free: Lead Free; Lifecycle Status: Obsolete; Max Current Rating: 2.7A; Max DC Current: 2.7A; Max Operating Temperature: 125°C; Military Standard: Not; Min Operating Temperature: -55°C; Mounting Technology: Surface Mount; Pins: 2; Number of Terminals: 2; Radiation Hardening: No; REACH SVHC: Yes; RMS Current (Irms): 2.7A; Schedule B: 8504500000, 8504500000|8504500000|8504500000|8504500000|8504500000; Termination: SMD/SMT; Tolerance: 20%; Width: 3mm; ComponentLink1URL: https://datasheet.octopart.com:443/IHLP1212BZER3R3M11-Vishay-datasheet-148646260.pdf?src-supplier=Upverter; ComponentLink1Description: https://datasheet.octopart.com:443/IHLP1212BZER3R3M11-Vishay-datasheet-148646260.pdf?src-supplier=Upverter; ComponentLink2URL: https://datasheet.octopart.com:443/IHLP1212BZER3R3M11-Vishay-datasheet-176385411.pdf?src-supplier=IHS; ComponentLink2Description: https://datasheet.octopart.com:443/IHLP1212BZER3R3M11-Vishay-datasheet-176385411.pdf?src-supplier=IHS; ComponentLink3URL: https://datasheet.octopart.com/IHLP1212BZER3R3M11-Vishay-datasheet-12545201.pdf; ComponentLink3Description: https://datasheet.octopart.com/IHLP1212BZER3R3M11-Vishay-datasheet-12545201.pdf; ComponentLink4URL: https://datasheet.octopart.com/IHLP1212BZER3R3M11-Vishay-datasheet-12520458.pdf; ComponentLink4Description: https://datasheet.octopart.com/IHLP1212BZER3R3M11-Vishay-datasheet-12520458.pdf; ComponentLink5URL: https://datasheet.octopart.com/IHLP1212BZER3R3M11-Vishay-datasheet-11041154.pdf; ComponentLink5Description: https://datasheet.octopart.com/IHLP1212BZER3R3M11-Vishay-datasheet-11041154.pdf; ComponentLink6URL: https://datasheet.octopart.com/IHLP1212BZER3R3M11-Vishay-datasheet-10631380.pdf; ComponentLink6Description: https://datasheet.octopart.com/IHLP1212BZER3R3M11-Vishay-datasheet-10631380.pdf; ComponentLink7URL: https://datasheet.octopart.com:443/IHLP1212BZER3R3M11-Vishay-datasheet-41571090.pdf?src-supplier=Newark; ComponentLink7Description: https://datasheet.octopart.com:443/IHLP1212BZER3R3M11-Vishay-datasheet-41571090.pdf?src-supplier=Newark; ComponentLink8URL: https://datasheet.octopart.com:443/IHLP1212BZER3R3M11-Vishay-datasheet-41484499.pdf?src-supplier=Farnell; ComponentLink8Description: https://datasheet.octopart.com:443/IHLP1212BZER3R3M11-Vishay-datasheet-41484499.pdf?src-supplier=Farnell; ComponentLink9URL: http://sigma.octopart.com:80/rohs_statement/Vishay-company-15.pdf?src-supplier=Compliance+Statements; ComponentLink9Description: http://sigma.octopart.com:80/rohs_statement/Vishay-company-15.pdf?src-supplier=Compliance+Statements
footprint IHLP1212BZER3R3M11
pins: 1, 2

## IHLP1212BZERR22M11
designator L?, comment 220nH
6.5A 220nH ±20% 9.5mΩ SMD Power Inductors ROHS; Manufacturer: Vishay Dale; Manufacturer Part Number: IHLP1212BZERR22M11; Core Material: Metal,Composite; Saturation Current: 7.5A; Shielding: Shielded; Self Resonant Frequency: 245MHz; DC Resistance (DCR): 11.4mR; Test Frequency: 100kHz; Supplier 1: Avnet; RoHS: Yes; Category: Fixed Inductors; Stock 1: 3000; Pricing 1: 3000=0.65286 (USD); Mount: Surface Mount; Case/Package: 1212; Number of Pins: 2; Case Code (Metric): 3630; Case Code (Imperial): 1212; Min Operating Temperature: -55°C; Max Operating Temperature: 125°C; Inductance Tolerance: 20%; Packaging: Tape and Reel; Package Quantity: 3000; Current Rating: 6.5A; Tolerance: 20%; Inductance: 220nH; Max DC Current: 6.5A; Termination: SMD/SMT; RMS Current (Irms): 6.5A; Series: IHLP-1212BZ-11; Length: 3.6mm; Width: 0.118inch; Height: 2mm; Height - Seated (Max): 0.079inch; Depth: 3.2mm; Radiation Hardening: No; Military Standard: Not; Lead Free: Lead Free; RoHS Compliant: Yes; ComponentLink1URL: https://datasheet.ciiva.com/11798/0900766b8102b422-11798291.pdf?src-supplier=RSComponents; ComponentLink1Description: https://datasheet.ciiva.com/11798/0900766b8102b422-11798291.pdf?src-supplier=RSComponents; ComponentLink2URL: https://datasheet.ciiva.com/1050/lp12bz11-1050115.pdf?src-supplier=Digi-Key; ComponentLink2Description: https://datasheet.ciiva.com/1050/lp12bz11-1050115.pdf?src-supplier=Digi-Key; ComponentLink3URL: https://datasheet.ciiva.com/1050/lp12bz11-1050116.pdf?src-supplier=Digi-Key; ComponentLink3Description: https://datasheet.ciiva.com/1050/lp12bz11-1050116.pdf?src-supplier=Digi-Key; ComponentLink4URL: https://datasheet.ciiva.com/1050/lp12bz11-1050117.pdf?src-supplier=Digi-Key; ComponentLink4Description: https://datasheet.ciiva.com/1050/lp12bz11-1050117.pdf?src-supplier=Digi-Key; ComponentLink5URL: https://datasheet.ciiva.com/3081/lp12bz11-3081918.pdf?src-supplier=Avnet; ComponentLink5Description: https://datasheet.ciiva.com/3081/lp12bz11-3081918.pdf?src-supplier=Avnet; Supplier Part Number 1: IHLP1212BZERR22M11
footprint IHLP1212BZERR22M11
pins: 1, 2